# Altium schematic symbol library MIE1W0505BGLVH-3R-P.SchLib: 1 symbol
Pins are listed as number, name and electrical type; pins without a type are passive.

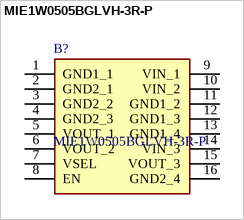
[diagram p0: symbol MIE1W0505BGLVH-3R-P]

## MIE1W0505BGLVH-3R-P
designator B?
Isolated DC/DC Converters - SMD Next gen ultra small size isolated power module; Manufacturer_Name: Monolithic Power Systems (MPS); Geometry.Height: 1.28mm; Mouser Part Number: 946-MIE1W0505BGLVH3P; Mouser Price/Stock: https://www.mouser.co.uk/ProductDetail/Monolithic-Power-Systems-MPS/MIE1W0505BGLVH-3R-P?qs=mELouGlnn3eSWSUCjBsRGQ%3D%3D; Manufacturer_Part_Number: MIE1W0505BGLVH-3R-P; Datasheet Link: https://www.mouser.de/datasheet/2/277/MIE1W0505BGLVH-3392698.pdf
footprint MIE1W0505BGLVH3RP
pins: 1 GND1_1, 2 GND2_1, 3 GND2_2, 4 GND2_3, 5 VOUT_1, 6 VOUT_2, 7 VSEL, 8 EN, 9 VIN_1, 10 VIN_2, 11 GND1_2, 12 GND1_3, 13 GND1_4, 14 VIN_3, 15 VOUT_3, 16 GND2_4